# Altium footprint library Footprint.PcbLib: 2 footprints
Each footprint in its own frame and in the unit in brackets; x right, y up, seen from the top. Pads: shape width x height; smd on the part's side, far side on the other; paste and mask are expansions set on the pad; w line width, h text height; cw(c..) or ccw(c..) is an arc to the next point about the centre after c.
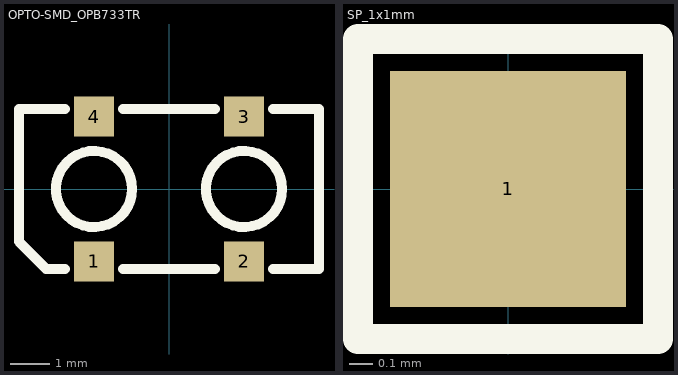
[diagram p0: the footprints below, top view; thin cyan lines are the x and y axes]

## OPTO-SMD_OPB733TR [mm]
pads (4):
  rect 1.02x1.02 smd paste+0 mask+0.05: 1(-1.905,-1.84) 2(1.905,-1.84) 3(1.905,1.84) 4(-1.905,1.84)
Top Overlay:
  circle w0.254: c-1.905,0 r0.967
  circle w0.254: c1.905,0 r0.967
  lines w0.254: -2.646,-2.03 -3.119,-2.03 -3.81,-1.339 -3.81,2.03 -2.646,2.03 ; -1.164,-2.03 1.164,-2.03 ; -1.164,2.03 1.164,2.03 ; 2.646,-2.03 3.81,-2.03 3.81,2.03 2.646,2.03
3D body "OPB733TR.STEP": height 3.25, standoff -0.02, extent -3.81,-2.35 3.81,2.35

## SP_1x1mm [mm]
pads (1):
  rect 1x1 smd paste+0 mask+0.05: 1(0,0)
Top Overlay:
  lines w0.127: -0.635,-0.635 -0.635,0.635 0.635,0.635 0.635,-0.635 -0.635,-0.635